# Altium footprint library Module.PcbLib: 28 footprints (part 2 of 2)
Each footprint in its own frame and in the unit in brackets; x right, y up, seen from the top. Pads: shape width x height; smd on the part's side, far side on the other; paste and mask are expansions set on the pad; w line width, h text height; cw(c..) or ccw(c..) is an arc to the next point about the centre after c.
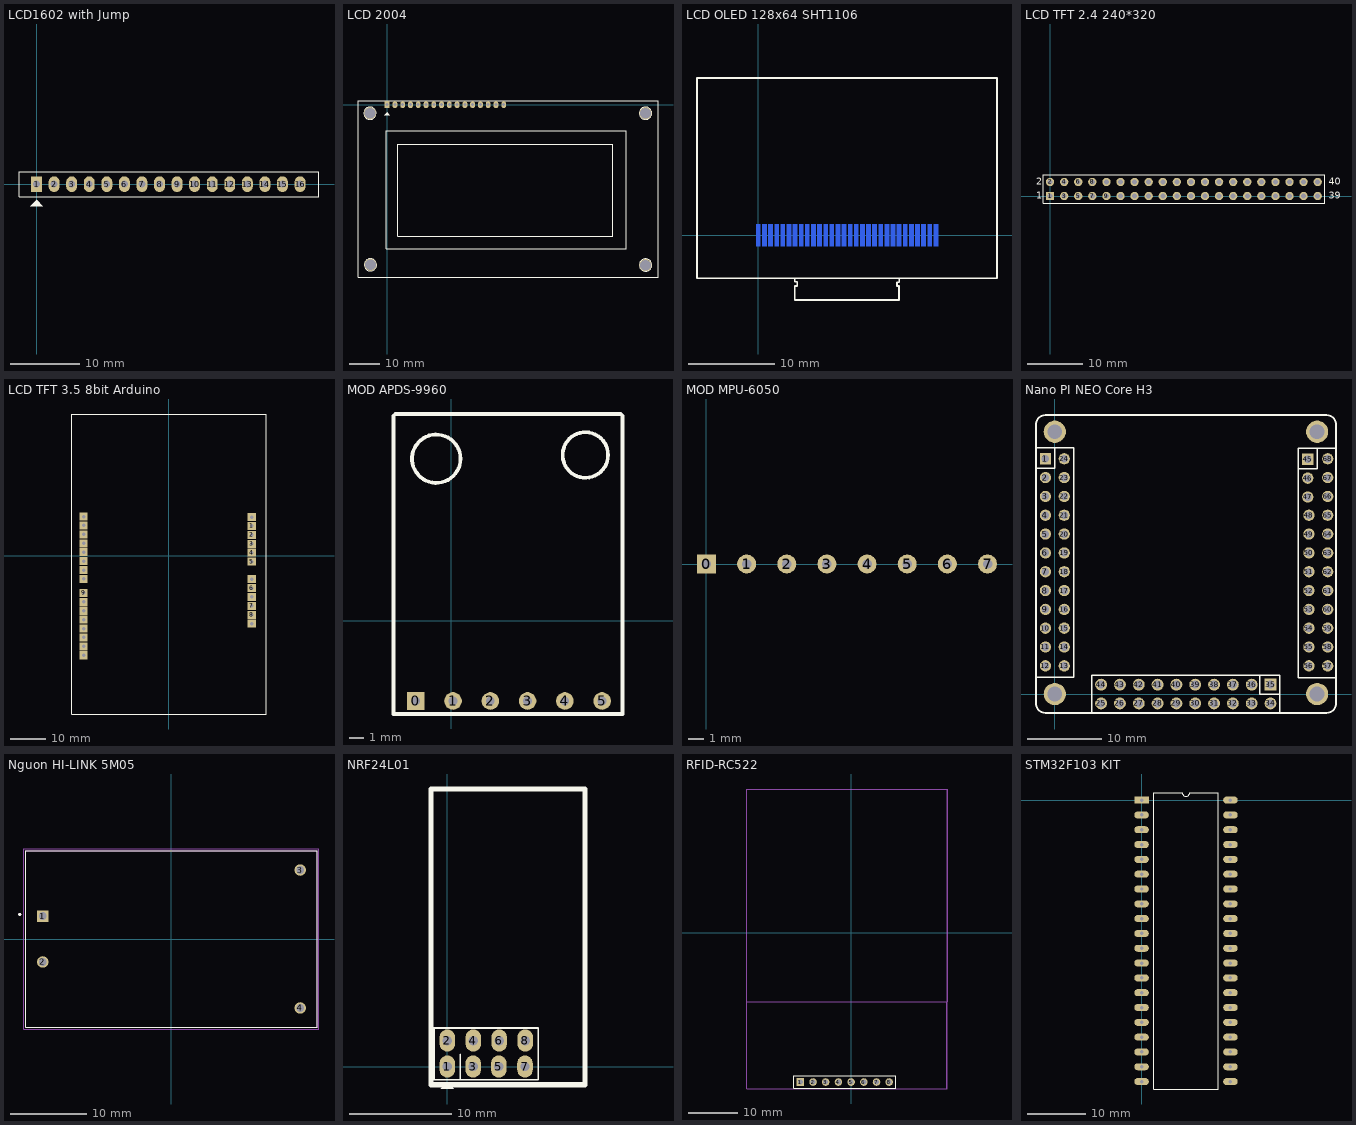
[diagram p1: the footprints below, top view; thin cyan lines are the x and y axes]

## LCD1602 with Jump [mil] "LCD dipslay 16x2, 16 pin"
height 400
pads (16):
  rect 62x90 hole 39: 1(0,0)
  oval 62x90 hole 39: 2(100,0) 3(200,0) 4(300,0) 5(400,0) 6(500,0) 7(600,0) 8(700,0) 9(800,0) 10(900,0) 11(1000,0) 12(1100,0) 13(1200,0) 14(1300,0) 15(1400,0) 16(1500,0)
Top Overlay:
  region: 0,-90 -35,-125 35,-125
  lines w7: -100,-71 -100,70 1608,70 1608,-71 -100,-71
3D body "socket16.stp": height 276.19, standoff -117.51, extent -49,-49 1551,51
3D body "jp16.stp": height 468.11, standoff -20.08, extent -48.03,-48.43 1548.03,50
3D body "lcd16.STEP": height 764, standoff 244, extent -319.64,-1353.49 2849.65,83.51

## LCD 2004 [mil] "LCD dipslay 20x4, 16 pin"
height 400
pads (20):
  rect 62x90 hole 39: 1(0,0)
  oval 62x90 hole 39: 2(100,0) 3(200,0) 4(300,0) 5(400,0) 6(500,0) 7(600,0) 8(700,0) 9(800,0) 10(900,0) 11(1000,0) 12(1100,0) 13(1200,0) 14(1300,0) 15(1400,0) 16(1500,0)
  round 157.48 hole 137.8: "Hole 0"(-220,-110) "Hole 0"(-215,-2060) "Hole 0"(3325,-2065) "Hole 0"(3325,-110)
Top Overlay:
  circle w7: c3324.94,-2063 r79.06
  circle w7: c3324.94,-110 r79.06
  circle w7: c-221.06,-110 r79.06
  circle w7: c-215.06,-2061 r79.06
  region: 0,-100 -35,-135 35,-135
  lines w7: -375,-2220 -375,50 3485,50 3485,-2220 -374,-2220 ; -11,-1852 -11,-337 3076,-337 3076,-1852 -11,-1852 ; 139,-1695 139,-512 2905,-512 2905,-1695 139,-1695
3D body "User Library-LCD20_4.STEP": height 417.32, standoff -125.98, extent -392.13,-2264.2 3466.13,98

## LCD OLED 128x64 SHT1106 [mm]
pads (30):
  rect 0.5x2.5 smd far side: 1(0,0) 2(0.705,0) 3(1.41,0) 4(2.115,0) 5(2.82,0) 6(3.525,0) 7(4.23,0) 8(4.935,0) 9(5.641,0) 10(6.346,0) 11(7.051,0) 12(7.756,0) 13(8.461,0) 14(9.166,0) 15(9.871,0) 16(10.576,0) 17(11.281,0) 18(11.986,0) 19(12.691,0) 20(13.396,0) 21(14.101,0) 22(14.806,0) 23(15.512,0) 24(16.217,0) 25(16.922,0) 26(17.627,0) 27(18.332,0) 28(19.037,0) 29(19.742,0) 30(20.447,0)
Top Overlay:
  lines w0.2: 4.216,-4.953 4.191,-4.953 4.191,-5.359 4.496,-5.359 4.496,-5.842 4.191,-5.842 4.191,-7.442 16.205,-7.442 16.205,-5.842 15.977,-5.842 15.977,-5.436 15.977,-5.41 16.231,-5.41 16.231,-4.953 16.281,-4.953 ; -7.061,-4.953 27.483,-4.953 27.483,18.11 -7.061,18.11 -7.061,-4.953
3D body: height 3.4, standoff 2, extent -7.087,-4.978 27.483,18.085

## LCD TFT 2.4 240*320 [mm] "Connector; Header; 20x2 Position"
height 1.14
pads (40):
  rect 1.5x1.5 hole 0.9: 1(0,0)
  round 1.5 hole 0.9: 2(0,2.54) 3(2.54,0) 4(2.54,2.54) 5(5.08,0) 6(5.08,2.54) 7(7.62,0) 8(7.62,2.54) 9(10.16,0) 10(10.16,2.54) 11(12.7,0) 12(12.7,2.54) 13(15.24,0) 14(15.24,2.54) 15(17.78,0) 16(17.78,2.54) 17(20.32,0) 18(20.32,2.54) 19(22.86,0) 20(22.86,2.54) 21(25.4,0) 22(25.4,2.54) 23(27.94,0) 24(27.94,2.54) 25(30.48,0) 26(30.48,2.54) 27(33.02,0) 28(33.02,2.54) 29(35.56,0) 30(35.56,2.54) 31(38.1,0) 32(38.1,2.54) 33(40.64,0) 34(40.64,2.54) 35(43.18,0) 36(43.18,2.54) 37(45.72,0) 38(45.72,2.54) 39(48.26,0) 40(48.26,2.54)
Top Overlay:
  lines w0.2: -1.27,-1.27 49.53,-1.27 49.53,3.81 -1.27,3.81 -1.27,-1.27
  text "1" at -2.54,-0.508 h1.27
  text "2" at -2.54,2.032 h1.27
  text "40" at 50.292,2.032 h1.27
  text "39" at 50.292,-0.508 h1.27
3D body "User Library-TFT 3_2 with touch screen.STEP": height 6.02, standoff -8.42, extent -7.881,-89.489 56.119,4.511

## LCD TFT 3.5 8bit Arduino [mm]
pads (28):
  rect 2.3x2.3 hole 1: 1(23.746,8.434) 2(23.746,5.894) 3(23.746,3.354) 4(23.746,0.814) 5(23.746,-1.726) 6(23.746,-9.286) 7(23.746,-14.366) 8(23.746,-16.906) 9(-24.254,-10.666) 10(-24.254,-13.206) 11(-24.254,6.034) 12(-24.254,3.494) 13(-24.254,0.954) 14(-24.254,-1.586) 15(-24.254,-4.126) 16(-24.254,-6.666) 17(-24.254,-15.746) 18(-24.254,-18.286) 19(-24.254,-20.826) 20(-24.254,-23.366) AREF(-24.254,-28.446) GND(23.746,-11.826) GND3(-24.254,-25.906) NC(-24.254,8.574) NC(-24.254,11.114) RESET(23.746,-19.446) RESET(23.746,10.974) Vin(23.746,-6.746)
Top Overlay:
  lines w0.254: -27.686,-45.212 27.94,-45.212 27.94,40.386 -27.686,40.386 -27.686,-45.212
3D body "3.5TFT.STEP": height 14.53, standoff -0.31, extent -27.813,-45.318 27.817,40.492

## MOD APDS-9960 [mm]
pads (6):
  rect 1.2x1.2 hole 0.6: 0(-2.413,-5.461)
  round 1.2 hole 0.6: 1(0.127,-5.461) 2(2.667,-5.461) 3(5.207,-5.461) 4(7.747,-5.461) 5(10.287,-5.461)
Top Overlay:
  circle w0.254: c9.144,11.303 r1.55
  circle w0.254: c-1.016,11.049 r1.651
  lines w0.254: -3.937,13.97 -3.937,-6.35 11.684,-6.35 11.684,13.97 11.557,14.097 -3.81,14.097
3D body "?????? ???????? ??????, ?????, ??????????? APDS-9960.SLDPRT": height 9.47, standoff -1.88, extent -3.813,-6.35 11.687,14.089

## MOD MPU-6050 [mm]
pads (8):
  rect 1.2x1.2 hole 0.6: 0(0,0)
  round 1.2 hole 0.6: 1(2.54,0) 2(5.08,0) 3(7.62,0) 4(10.16,0) 5(12.7,0) 6(15.24,0) 7(17.78,0)
3D body "ITG-MPU.STEP": height 11.03, standoff -0.72, extent -1.987,-1.524 19.513,14.976

## Nano PI NEO Core H3 [mm]
pads (72):
  rect 1.52x1.52 hole 1.02: 1(-1.27,31.75) 45(34.138,31.674)
  round 1.52 hole 1.02: 2(-1.27,29.21) 3(-1.27,26.67) 4(-1.27,24.13) 5(-1.27,21.59) 6(-1.27,19.05) 7(-1.27,16.51) 8(-1.27,13.97) 9(-1.27,11.43) 10(-1.27,8.89) 11(-1.27,6.35) 12(-1.27,3.81) 13(1.27,3.81) 14(1.27,6.35) 15(1.27,8.89) 16(1.27,11.43) 17(1.27,13.97) 18(1.27,16.51) 19(1.27,19.05) 20(1.27,21.59) 21(1.27,24.13) 22(1.27,26.67) 23(1.27,29.21) 24(1.27,31.75) 46(34.138,29.134) 47(34.138,26.594) 48(34.29,24.13) 49(34.29,21.59) 50(34.29,19.05) 51(34.29,16.51) 52(34.29,13.97) 53(34.29,11.43) 54(34.29,8.89) 55(34.29,6.35) 56(34.29,3.81) 57(36.83,3.81) 58(36.83,6.35) 59(36.83,8.89) 60(36.83,11.43) 61(36.83,13.97) 62(36.83,16.51) 63(36.83,19.05) 64(36.83,21.59) 65(36.83,24.13) 66(36.83,26.67) 67(36.83,29.21) 68(36.83,31.75)
  round 1.6 hole 1.1: 25(6.248,-1.27) 26(8.788,-1.27) 27(11.328,-1.27) 28(13.868,-1.27) 29(16.408,-1.27) 30(18.948,-1.27) 31(21.488,-1.27) 32(24.028,-1.27) 33(26.568,-1.27) 34(29.108,-1.27) 36(26.568,1.27) 37(24.028,1.27) 38(21.488,1.27) 39(18.948,1.27) 40(16.408,1.27) 41(13.868,1.27) 42(11.328,1.27) 43(8.788,1.27) 44(6.248,1.27)
  rect 1.6x1.6 hole 1.1: 35(29.108,1.27)
  round 3 hole 2: ""(0,0) ""(0,35.4) ""(35.4,0) ""(35.4,35.4)
Top Overlay:
  lines w0.2: -2.54,30.484 0,30.484 0,33.274 ; 27.686,2.54 27.686,0 30.226,0 ; 33.02,30.404 35.408,30.404 35.408,33.194 ; -2.54,2.294 -2.54,33.274 2.54,33.274 2.54,2.294 -2.54,2.294 ; 4.978,-2.54 4.978,2.54 30.378,2.54 30.378,-2.54 4.978,-2.54 ; 32.868,2.214 32.868,33.194 37.948,33.194 37.948,2.214 32.868,2.214
  lines w0.254: -2.54,-1.27 ccw(c-1.27,-1.27) -1.27,-2.54 36.678,-2.54 ccw(c36.678,-1.27) 37.948,-1.27 37.948,36.373 ccw(c36.678,36.373) 36.678,37.643 -1.27,37.643 ccw(c-1.27,36.373) -2.54,36.373 -2.54,2.294 -2.54,-1.27
3D body "61302421821.stp": height 8.51, standoff -3.09, extent 32.867,2.214 37.947,33.194
3D body "61302421821.stp": height 8.51, standoff -3.09, extent -2.54,2.294 2.54,33.274
3D body "61302021121.stp": height 8.55, standoff -2.99, extent 4.978,-2.54 30.378,2.54

## Nguon HI-LINK 5M05 [mm]
pads (4):
  rect 1.5x1.5 hole 1: 1(-16.8,3)
  round 1.5 hole 1: 2(-16.8,-3) 3(16.8,9) 4(16.8,-9)
Top Overlay:
  circle w0.2: c-19.8,3.2 r0.1
  lines w0.127: -19,-11.5 19,-11.5 19,11.5 -19,11.5 -19,-11.5
Mechanical 13:
  circle w0.2: c-19.8,3.2 r0.1
  lines w0.127: -19,-11.5 -19,11.5 19,11.5 19,-11.5 -19,-11.5
Mechanical 15:
  lines w0.05: -19.25,-11.75 -19.25,11.75 19.25,11.75 19.25,-11.75 -19.25,-11.75
3D body "HLK-5M05.stp": height 18.01, standoff -3.1, extent -19.077,-11.5 18.923,11.5

## NRF24L01 [mil]
pads (8):
  oval 60x86 hole 36: 1(0,0) 2(0,100) 3(99,0) 4(100,100) 5(198,0) 6(199.5,100) 7(299,0) 8(300,100)
Top Overlay:
  region: -0.5,-61.5 -25.5,-86.5 24.5,-86.5
  lines w7: 49.5,-50.5 49.5,47.5 ; -51,-51 350,-51 350,149 -51,149 -51,49 -51,-51
  lines w20: -63,-70 530,-70 530,1069.2 -63,1069.2 -63,-70
3D body "User Library-MY-NRF24L01P.STEP": height 587.8, standoff 0.73, extent -73,-73.7 517.55,1068.03

## RFID-RC522 [mil]
pads (8):
  rect 59.37x59.37 / inner round 59.37 / far side rect 59.37x59.37 hole 39.37 mask+4.02: 1(-402,-1174)
  round 59.37 hole 39.37 mask+4.02: 2(-302,-1174) 3(-202,-1174) 4(-102,-1174) 5(-2,-1174) 6(98,-1174) 7(198,-1174) 8(298,-1174)
Top Overlay:
  lines w8: -453,-1225 349,-1225 349,-1123 -453,-1123 -453,-1225
Top Assembly:
  lines w8: 753,-540 753,-1229 -824,-1229 -824,-540 ; -824,-540 -824,1133 754,1133 754,-540 -824,-540
the flat protection:
  lines w3.94: -824,1134 755,1134 755,-1229 -823,-1229 -823,1132.55
  text "+" at -19,-29 h60
Mechanical 29:
  text ".Designator" at -129,86.33 h60
3D body "RFID.STEP": height 265.35, standoff -188.98, extent -818.34,-1233.46 756.46,1128.74

## STM32F103 KIT [mm]
pads (40):
  rect 2.5x1.2 hole 0.6: 1(0,0)
  oval 2.5x1.2 hole 0.6: 2(0,-2.54) 3(0,-5.08) 4(0,-7.62) 5(0,-10.16) 6(0,-12.7) 7(0,-15.24) 8(0,-17.78) 9(0,-20.32) 10(0,-22.86) 11(0,-25.4) 12(0,-27.94) 13(0,-30.48) 14(0,-33.02) 15(0,-35.56) 16(0,-38.1) 17(0,-40.64) 18(0,-43.18) 19(0,-45.72) 20(0,-48.26) 21(15.24,-48.26) 22(15.24,-45.72) 23(15.24,-43.18) 24(15.24,-40.64) 25(15.24,-38.1) 26(15.24,-35.56) 27(15.24,-33.02) 28(15.24,-30.48) 29(15.24,-27.94) 30(15.24,-25.4) 31(15.24,-22.86) 32(15.24,-20.32) 33(15.24,-17.78) 34(15.24,-15.24) 35(15.24,-12.7) 36(15.24,-10.16) 37(15.24,-7.62) 38(15.24,-5.08) 39(15.24,-2.54) 40(15.24,0)
Top Overlay:
  lines w0.2: 2.085,-49.53 2.085,1.27 6.985,1.27 ccw(c7.62,1.27) 8.255,1.27 13.155,1.27 13.155,-49.53 2.085,-49.53
3D body "STM32F103C8T6_Blue_Pill v6.step": height 16.12, standoff -2.15, extent -3.81,-53.966 19.05,3.594